# EAGLE library part PICO-W (library pixel)
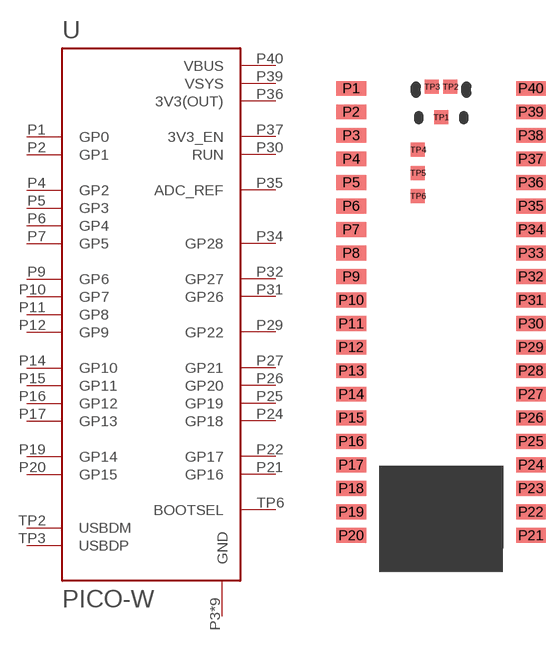
[diagram p35: symbol with the pads of PICO-W; footprint PICO-W]

Designator prefix -

## PICO-W  [PICO-W]
P1  GP0
P2  GP1
P3  GND  pwr
P4  GP2
P5  GP3
P6  GP4
P7  GP5
P8  GND  pwr
P9  GP6
P10  GP7
P11  GP8
P12  GP9
P13  GND  pwr
P14  GP10
P15  GP11
P16  GP12
P17  GP13
P18  GND  pwr
P19  GP14
P20  GP15
P21  GP16
P22  GP17
P23  GND  pwr
P24  GP18
P25  GP19
P26  GP20
P27  GP21
P28  GND  pwr
P29  GP22
P30  RUN  in
P31  GP26
P32  GP27
P33  GND  pwr
P34  GP28
P35  ADC_REF  in
P36  3V3(OUT)  pwr
P37  3V3_EN  in
P38  GND  pwr
P39  VSYS  pwr
P40  VBUS  pwr
TP1  GND  pwr
TP2  USBDM  pwr
TP3  USBDP  pwr
TP6  BOOTSEL  pwr

## Footprint PICO-W (pad centres in mm)
smd 3.2 x 1.6: P1 0.81,49.63; P2 0.81,47.09; P3 0.81,44.55; P4 0.81,42.01; P5 0.81,39.47; P6 0.81,36.93; P7 0.81,34.39; P8 0.81,31.85; P9 0.81,29.31; P10 0.81,26.77; P11 0.81,24.23; P12 0.81,21.69; P13 0.81,19.15; P14 0.81,16.61; P15 0.81,14.07; P16 0.81,11.53; P17 0.81,8.99; P18 0.81,6.45; P19 0.81,3.91; P20 0.81,1.37; P21 20.19,1.37; P22 20.19,3.91; P23 20.19,6.45; P24 20.19,8.99; P25 20.19,11.53; P26 20.19,14.07; P27 20.19,16.61; P28 20.19,19.15; P29 20.19,21.69; P30 20.19,24.23; P31 20.19,26.77; P32 20.19,29.31; P33 20.19,31.85; P34 20.19,34.39; P35 20.19,36.93; P36 20.19,39.47; P37 20.19,42.01; P38 20.19,44.55; P39 20.19,47.09; P40 20.19,49.63
smd 1.5 x 1.5: TP1 10.5,46.5; TP2 11.5,49.8; TP3 9.5,49.8; TP4 8,43; TP5 8,40.5; TP6 8,38